# Altium schematic symbol library ADRF6520.SchLib: 1 symbol
Pins are listed as number, name and electrical type; pins without a type are passive.

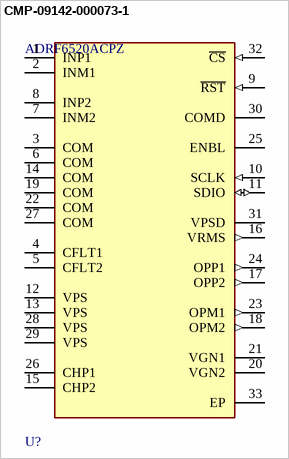
[diagram p0: symbol CMP-09142-000073-1]

## CMP-09142-000073-1
designator U?, comment ADRF6520ACPZ
IC RF AMP 1.25GHZ 32LFCSP; Noise Figure: 10.5dB; P1dB: 14dBm; Gain: 53dB; Frequency: 2GHz; Operating Supply Current: 425mA; Packaging: Tray; Number of Pins: 32; Test Frequency: 2GHz
footprint FP-CP-32-12-IPC_B
footprint FP-CP-32-12-IPC_A
footprint FP-CP-32-12-IPC_C
footprint FP-CP-32-12-MFG
pins: 1 INP1, 2 INM1, 3 COM, 4 CFLT1, 5 CFLT2, 6 COM, 7 INM2, 8 INP2, 9 ~{RST} (in), 10 SCLK (in), 11 SDIO (io), 12 VPS (power), 13 VPS (power), 14 COM, 15 CHP2, 16 VRMS (out), 17 OPP2 (out), 18 OPM2 (out), 19 COM, 20 VGN2, 21 VGN1, 22 COM, 23 OPM1 (out), 24 OPP1 (out), 25 ENBL, 26 CHP1, 27 COM, 28 VPS (power), 29 VPS (power), 30 COMD, 31 VPSD (power), 32 ~{CS} (in), 33 EP (power)